# Altium footprint library DT10966_MOTOR_CONTROLLER.PcbLib: 58 footprints (part 2 of 4)
Each footprint in its own frame and in the unit in brackets; x right, y up, seen from the top. Pads: shape width x height; smd on the part's side, far side on the other; paste and mask are expansions set on the pad; w line width, h text height; cw(c..) or ccw(c..) is an arc to the next point about the centre after c.
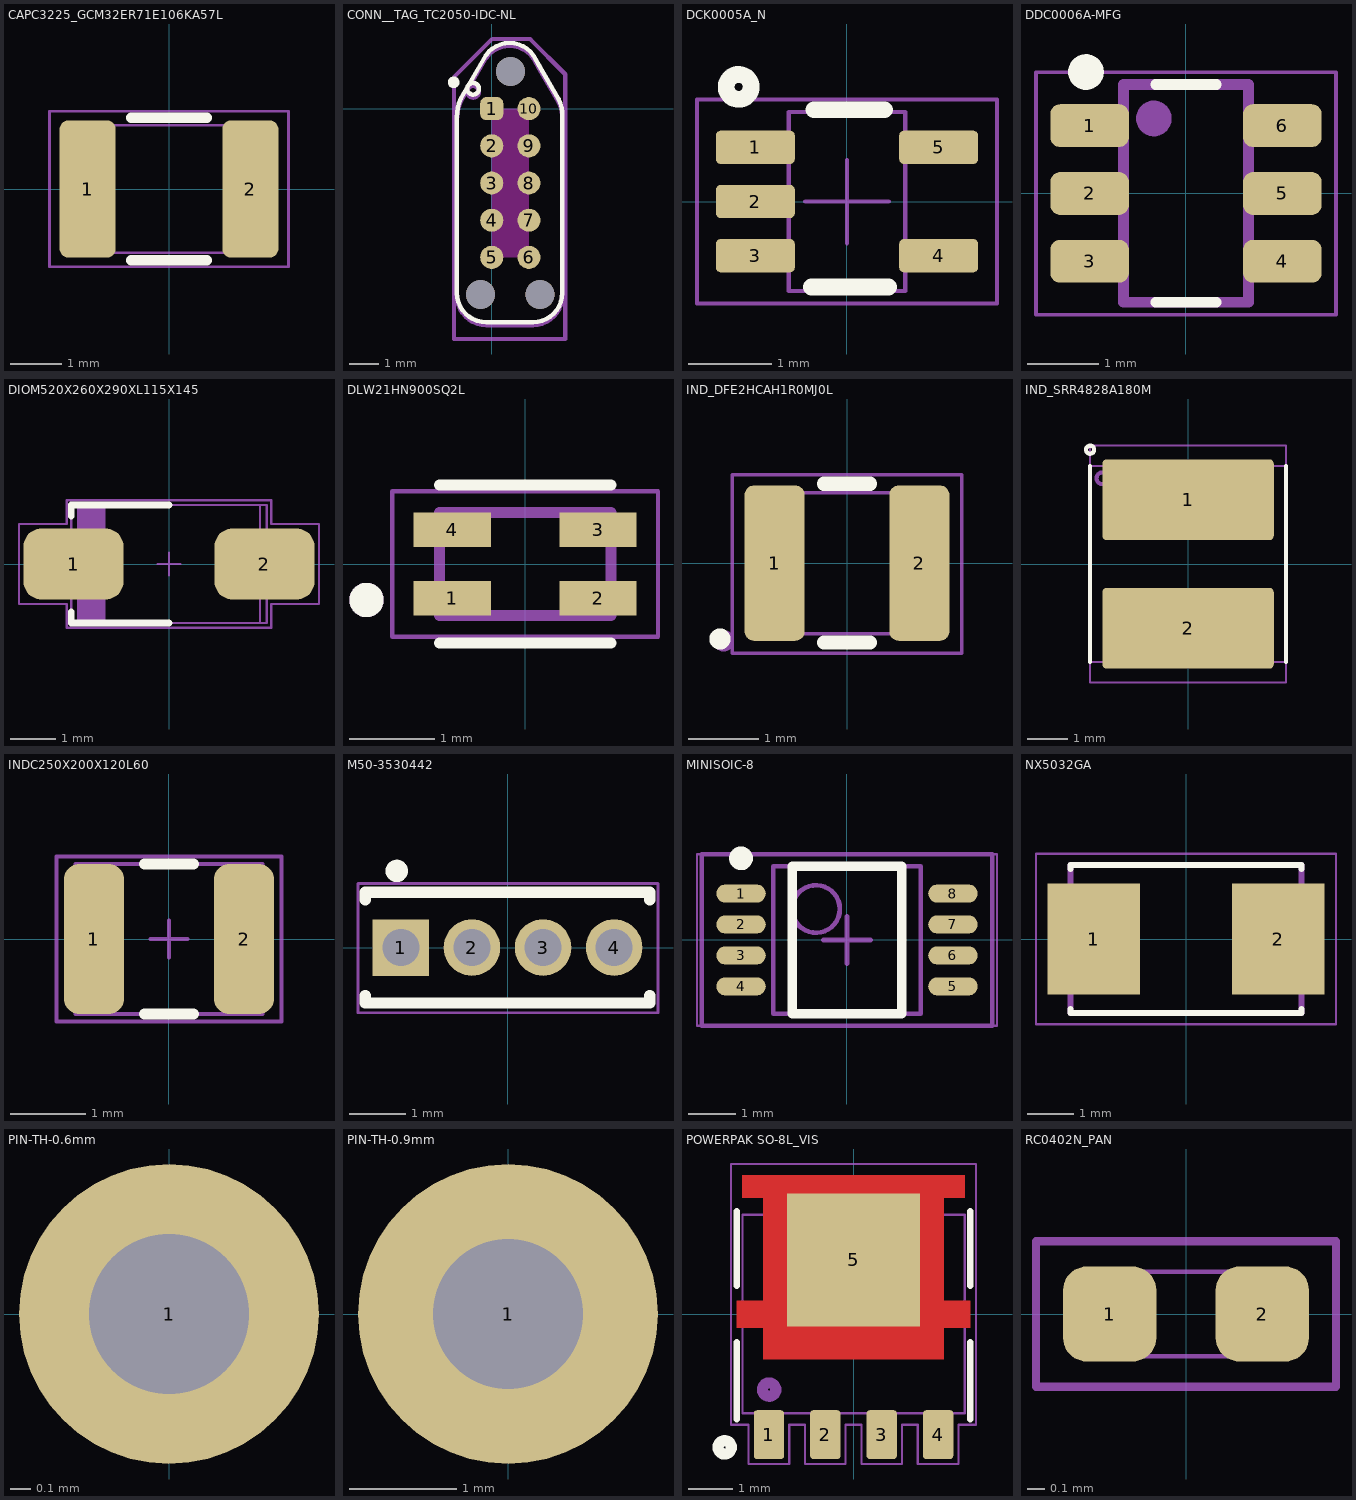
[diagram p1: the footprints below, top view; thin cyan lines are the x and y axes]

## CAPC3225_GCM32ER71E106KA57L [mm]
pads (2):
  rrect30% 1.1x2.7 smd: 1(-1.6,0) 2(1.6,0)
Top Overlay:
  lines w0.2: -0.75,-1.4 0.75,-1.4 ; -0.75,1.4 0.75,1.4
Top Assembly:
  lines w0.05: -1.125,-1.25 -1.125,1.25 ; 1.125,-1.25 1.125,1.25 ; -1.6,-1.25 -1.6,1.25 1.6,1.25 1.6,-1.25 -1.6,-1.25
  text "'.Designator'" at -2.417,1.48 h1
Top Courtyard:
  lines w0.05: -2.35,-1.525 -2.35,1.525 2.35,1.525 2.35,-1.525 -2.35,-1.525
3D body "GCM32EL8EF226KE08L.stp": height 2.52, standoff 0.02, extent -1.6,-1.25 1.6,1.25

## CONN__TAG_TC2050-IDC-NL [mm]
height 0.55
pads (13):
  rrect50% 0.787x0.787 smd paste-1: 1(0,0)
  round 0.787 smd paste-1: 2(0,-1.27) 3(0,-2.54) 4(0,-3.81) 5(0,-5.08) 6(1.27,-5.08) 7(1.27,-3.81) 8(1.27,-2.54) 9(1.27,-1.27) 10(1.27,0)
  round 0.991 hole 0.991 unplated: ""(-0.38,-6.35) ""(0.635,1.27) ""(1.65,-6.35)
Top Layer keep-out:
  region: 1.27,-5.08 0,-5.08 0,0 1.27,0
Top Overlay:
  circle w0.2: c-1.3,0.9 r0.1
  circle w0.152: c-0.64,0.68 r0.2
  lines w0.15: -1.19,-6.295 ccw(c-0.19,-6.295) -0.19,-7.295 1.41,-7.295 ccw(c1.41,-6.295) 2.41,-6.295 2.41,-3.095 2.41,-0.295 ccw(c1.097,-0.233) 2.285,0.33 1.634,1.446 1.426,1.816 ccw(c0.61,1.249) -0.206,1.816 -1.065,0.33 ccw(c0.301,-0.268) -1.19,-0.295 -1.19,-6.295
Keep-Out Layer:
  region: 1.27,-5.08 0,-5.08 0,0 1.27,0
Top Assembly:
  circle w0.152: c-0.64,0.58 r0.2
  lines w0.15: -1.19,-6.395 ccw(c-0.19,-6.395) -0.19,-7.395 1.41,-7.395 ccw(c1.41,-6.395) 2.41,-6.395 2.41,-3.195 2.41,-0.395 ccw(c1.097,-0.333) 2.285,0.23 1.634,1.346 1.426,1.716 ccw(c0.61,1.149) -0.206,1.716 -1.065,0.23 ccw(c0.301,-0.368) -1.19,-0.395 -1.19,-6.395
  text "'.Designator'" at 0.354,-5.288 h1
Top Courtyard:
  lines w0.152: -1.29,-7.87 2.51,-7.87 2.51,1.18 1.31,2.38 0.01,2.38 -1.29,1.08 -1.29,-7.87
3D body "step_temp.STEP": height 201.41, standoff -2.99, extent -7.02,-8.748 8.22,7

## DCK0005A_N [mm]
height 0.55
pads (5):
  rrect30% 0.95x0.4 smd mask+0: 1(-1.1,0.65) 2(-1.1,0) 3(-1.1,-0.65)
  rrect30% 0.95x0.4 smd: 4(1.1,-0.65) 5(1.1,0.65)
Top Overlay:
  circle w0.2: c-1.3,1.375 r0.15
  lines w0.2: -0.425,-1.025 0.5,-1.025 ; -0.4,1.1 0.45,1.1
Top Solder:
  rectangle: -1.669,-0.95 -0.523,0.955
Top Assembly:
  lines w0.05: -0.865,0.762 -0.853,0.762 ; -0.711,-0.763 -0.853,-0.763 -0.865,-0.763 -0.959,-0.763 -1.143,-0.763 -1.143,-0.538 -0.959,-0.538 -0.865,-0.538 -0.853,-0.538 -0.711,-0.538 ; -0.711,-0.113 -0.853,-0.113 -0.865,-0.113 -0.959,-0.113 -1.143,-0.113 -1.143,0.112 -0.959,0.112 -0.865,0.112 -0.853,0.112 -0.711,0.112 ; -0.711,0.537 -0.853,0.537 -0.865,0.537 -0.959,0.537 -1.143,0.537 -1.143,0.762 -0.959,0.762 -0.711,0.762 ; 0.711,-0.763 0.847,-0.763 0.859,-0.763 0.953,-0.763 1.137,-0.763 1.137,-0.538 0.953,-0.538 0.859,-0.538 0.847,-0.538 0.711,-0.538 ; 0.711,0.537 0.847,0.537 0.859,0.537 0.953,0.537 1.137,0.537 1.137,0.762 0.953,0.762 0.859,0.762 0.847,0.762 0.711,0.762 ; -0.7,-1.075 0.7,-1.075 0.7,1.075 -0.7,1.075 -0.7,-1.075
  text "'.Designator'" at -2.667,-0.087 h1
Top Courtyard:
  lines w0.05: -0.5,0 0.5,0 ; 0,-0.5 0,0.5 ; -1.8,-1.225 -1.8,1.225 1.8,1.225 1.8,-1.225 -1.8,-1.225
3D body "TLV9001IDCKR.STEP": height 1.1, standoff 0, extent -1.05,-1 1.05,1

## DDC0006A-MFG [mm]
height 0.55
pads (6):
  rrect45% 1.1x0.6 smd: 1(-1.35,0.95) 2(-1.35,0) 3(-1.35,-0.95) 4(1.35,-0.95) 5(1.35,0) 6(1.35,0.95)
Top Overlay:
  circle w0.25: c-1.4,1.7 r0.125
  lines w0.15: -0.425,-1.525 0.425,-1.525 ; -0.425,1.525 0.425,1.525
Top Assembly:
  circle w0.25: c-0.45,1.05 r0.125
  lines w0.15: -0.875,-1.525 -0.875,1.525 0.875,1.525 0.875,-1.525 -0.875,-1.525
  text "'.Designator'" at -2.337,-0.214 h1
Top Courtyard:
  lines w0.05: -2.1,-1.7 2.1,-1.7 2.1,1.7 -2.1,1.7 -2.1,-1.7
3D body "DDC0006A.stp": height 0.95, standoff 0, extent -1.435,-1.45 1.435,1.45

## DIOM520X260X290XL115X145 [mm] "SMA (JEDEC DO-214AC)"
height 2.9
pads (2):
  rrect50% 2.2x1.56 smd: 1(-2.1,0) 2(2.1,0)
Top Overlay:
  lines w0.15: -2.15,-1.05 -2.15,-1.3 0,-1.3 ; -2.15,1.05 -2.15,1.3 0,1.3
Top Assembly:
  rectangle: -2,-1.3 -1.4,1.3
  lines w0.05: -2.15,-0.725 -2.6,-0.725 -2.6,0.725 -2.15,0.725 ; -2,-1.3 -2,1.3 ; 2,-1.3 2,1.3 ; 2.15,-0.725 2.6,-0.725 2.6,0.725 2.15,0.725 ; -2.15,-1.3 -2.15,1.3 2.15,1.3 2.15,-1.3 -2.15,-1.3
  text "'.Designator'" at -2.417,-0.226 h1
Top Courtyard:
  lines w0.05: -0.25,0 0.25,0 ; 0,-0.25 0,0.25 ; -3.3,-0.88 -2.25,-0.88 -2.25,-1.4 0,-1.4 2.25,-1.4 2.25,-0.88 3.3,-0.88 3.3,0 3.3,0.88 2.25,0.88 2.25,1.4 0,1.4 -2.25,1.4 -2.25,0.88 -3.3,0.88 -3.3,0 -3.3,-0.88
3D body "SMA 5.2x2.6x2.4 (JEDEC DO-214AC) SMD.step": height 2.6, standoff 0.03, extent -2.75,-1.4 2.75,1.4

## DLW21HN900SQ2L [mm]
height 0.55
pads (4):
  rect 0.9x0.4 smd paste-1 mask+0.05: 1(-0.85,-0.4) 2(0.85,-0.4) 3(0.85,0.4) 4(-0.85,0.4)
Top Overlay:
  circle w0.2: c-1.85,-0.42 r0.1
  lines w0.127: -1,-0.92 1,-0.92 ; -1,0.92 1,0.92
Top Paste:
  region: -0.4,-0.6 -1.3,-0.6 -1.3,-0.25 -0.4,-0.25
  region: 1.3,-0.6 0.4,-0.6 0.4,-0.25 1.3,-0.25
  region: -0.4,0.25 -1.3,0.25 -1.3,0.6 -0.4,0.6
  region: 1.3,0.25 0.4,0.25 0.4,0.6 1.3,0.6
Top Assembly:
  circle w0.2: c-1.85,-0.42 r0.1
  lines w0.127: -1,-0.6 1,-0.6 1,0.6 -1,0.6 -1,-0.6
  text "'.Designator'" at -2.3,1.288 h1
Top Courtyard:
  lines w0.05: -1.55,-0.85 -1.55,0.85 1.55,0.85 1.55,-0.85 -1.55,-0.85
3D body "step_temp.STEP": height 1, standoff 0, extent -1,-0.6 1,0.6

## IND_DFE2HCAH1R0MJ0L [mm]
pads (2):
  rrect30% 0.85x2.2 smd: 1(-1.025,0) 2(1.025,0)
Top Overlay:
  circle w0.2: c-1.8,-1.075 r0.05
  lines w0.2: -0.325,-1.125 0.325,-1.125 ; -0.325,1.125 0.325,1.125
Top Assembly:
  circle w0.2: c-1.75,-1.1 r0.05
  lines w0.05: -0.8,-1 -0.8,1 ; 0.8,-1 0.8,1 ; -1.25,-1 1.25,-1 1.25,1 -1.25,1 -1.25,-1
  text "'.Designator'" at -2.142,-0.187 h1
Top Courtyard:
  lines w0.05: -1.625,-1.275 -1.625,1.25 1.625,1.25 1.625,-1.275 -1.625,-1.275
3D body "DFE2HCAH1R5MJ0L.stp": height 1.2, standoff 0, extent -1.25,-1 1.25,1

## IND_SRR4828A180M [mm]
height 0.55
pads (2):
  rrect10% 4.2x1.98 smd: 1(0,1.575) 2(0,-1.575)
Top Overlay:
  circle w0.1: c-2.4,2.8 r0.1
  lines w0.1: -2.4,-2.4 -2.4,2.4 ; 2.4,-2.4 2.4,2.4
Top Assembly:
  circle w0.1: c-2.1,2.1 r0.141
  lines w0.05: -2.4,-2.4 -2.4,2.4 2.4,2.4 2.4,-2.4 -2.4,-2.4
  text "'.Designator'" at -2.542,-0.287 h1
Top Courtyard:
  lines w0.05: -2.4,-2.9 -2.4,2.9 2.4,2.9 2.4,-2.9 -2.4,-2.9
3D body "SRR4828A.stp": height 2.8, standoff 0.04, extent -2.4,-2.41 2.4,2.41

## INDC250X200X120L60 [mm] "EIA 1008 (2520) T1.20 2.50x2.00x1.20 Chip Inductor"
height 1.2
pads (2):
  rrect50% 0.8x2 smd: 1(-1,0) 2(1,0)
Top Overlay:
  lines w0.15: -0.325,-1 0.325,-1 ; -0.325,1 0.325,1
Top Assembly:
  lines w0.05: -1.25,-1 -1.25,1 1.25,1 1.25,-1 -1.25,-1
  text "'.Designator'" at -2.417,-0.414 h1
Top Courtyard:
  lines w0.05: -0.25,0 0.25,0 ; 0,-0.25 0,0.25 ; -1.5,-1.1 1.5,-1.1 1.5,1.1 -1.5,1.1 -1.5,-1.1
3D body "1239AS-H-100M=P2.STEP": height 1.2, standoff 0, extent -1.25,-1 1.25,1

## M50-3530442 [mm]
pads (4):
  rect 1.01x1.01 hole 0.66 mask+0.06: 1(-1.905,0)
  round 1.01 hole 0.66 mask+0.06: 2(-0.635,0) 3(0.635,0) 4(1.905,0)
Top Overlay:
  circle w0.2: c-1.978,1.369 r0.1
  lines w0.2: -2.54,-0.855 -2.54,-0.989 2.54,-0.989 2.54,-0.855 ; -2.54,0.855 -2.54,0.986 2.54,0.986 2.54,0.855
Top Courtyard:
  lines w0.05: -2.67,-1.164 2.688,-1.164 2.688,1.141 -2.67,1.141 -2.67,-1.164
3D body "M50-3530442_asm.stp": height 4.02, standoff -2.28, extent -2.531,-1.056 2.549,1.044

## MINISOIC-8 [mm] "MINISOIC, 8-Leads, Body 3,00x3,00mm, Pitch 0,65mm, IPC Medium Density"
height 1.1
pads (8):
  oval 1.04x0.38 smd: 1(-2.225,0.975) 2(-2.225,0.325) 3(-2.225,-0.325) 4(-2.225,-0.975) 5(2.225,-0.975) 6(2.225,-0.325) 7(2.225,0.325) 8(2.225,0.975)
Top Overlay:
  circle w0.25: c-2.225,1.715 r0.125
  lines w0.2: -1.15,-1.55 -1.15,1.55 1.15,1.55 1.15,-1.55 -1.15,-1.55
Mechanical 5:
  lines w0.05: -3.15,-1.8 -3.15,1.8 3.15,1.8 3.15,-1.8 -3.15,-1.8
  lines w0.1: -0.5,0 0.5,0 ; 0,-0.5 0,0.5
Top Assembly:
  circle w0.1: c-0.65,0.65 r0.5
  lines w0.1: -1.55,-1.55 1.55,-1.55 ; -1.55,-1.55 -1.55,1.55 ; -1.55,-1.55 1.55,-1.55 ; -1.55,-1.55 -1.55,1.55 ; -1.55,1.55 1.55,1.55 ; -1.55,1.55 1.55,1.55 ; 1.55,-1.55 1.55,1.55 ; 1.55,-1.55 1.55,1.55
  text "'.Designator'" at -2.85,1.8 h1.52
Top Courtyard:
  lines w0.1: -3.05,-1.8 -3.05,1.8 3.05,1.8 3.05,-1.8 -3.05,-1.8
3D body "MINISOIC-8.step": height 1.1, standoff 0, extent -2.45,-1.55 2.45,1.55

## NX5032GA [mm]
height 0.55
pads (2):
  rect 2x2.4 smd: 1(-2,0) 2(2,0)
Top Overlay:
  lines w0.127: -2.5,-1.52 -2.5,-1.6 2.5,-1.6 2.5,-1.52 ; -2.5,1.52 -2.5,1.6 2.5,1.6 2.5,1.52
Top Assembly:
  lines w0.127: -2.5,-1.6 2.5,-1.6 2.5,1.6 -2.5,1.6 -2.5,-1.6
  text "'.Designator'" at -6,2.07 h2.5
Top Courtyard:
  lines w0.05: -3.25,-1.85 3.25,-1.85 3.25,1.85 -3.25,1.85 -3.25,-1.85
3D body "step_temp.STEP": height 1.5, standoff 0, extent -2.5,-1.6 2.5,1.6

## PIN-TH-0.6mm [mm]
height 0.55
pads (1):
  round 1.5 hole 0.8: 1(0,0)

## PIN-TH-0.9mm [mm]
height 0.55
pads (1):
  round 2.8 hole 1.4: 1(0,0)

## POWERPAK SO-8L_VIS [mm]
height 0.55
pads (6):
  rrect20% 0.68x1.1 smd paste+0 mask+0: 1(-1.905,-2.715) 2(-0.635,-2.715) 3(0.635,-2.715) 4(1.905,-2.715)
  rect 0.127x0.127 smd paste-0.064 mask-0.064: 5(0,0.621)
  rect 3x3 smd paste+0 mask+0: 5(0,1.219)
Top Layer:
  region: 2.502,3.125 -2.502,3.125 -2.502,2.615 -2.032,2.615 -2.032,0.303 -2.627,0.303 -2.627,-0.307 -2.032,-0.307 -2.032,-1.017 2.032,-1.017 2.032,-0.307 2.627,-0.307 2.627,0.303 2.032,0.303 2.032,2.615 2.502,2.615
Top Overlay:
  circle w0.25: c-2.9,-3 r0.15
  lines w0.152: -2.629,-2.362 -2.629,-0.64 ; -2.629,0.636 -2.629,2.308 ; 2.629,-2.362 2.629,-0.64 ; 2.629,0.636 2.629,2.308
Top Paste:
  region: 2.502,3.125 -2.502,3.125 -2.502,2.615 -2.032,2.615 -2.032,0.303 -2.627,0.303 -2.627,-0.307 -2.032,-0.307 -2.032,-1.017 2.032,-1.017 2.032,-0.307 2.627,-0.307 2.627,0.303 2.032,0.303 2.032,2.615 2.502,2.615
Top Solder:
  region: 2.502,3.125 -2.502,3.125 -2.502,2.615 -2.032,2.615 -2.032,0.303 -2.627,0.303 -2.627,-0.307 -2.032,-0.307 -2.032,-1.017 2.032,-1.017 2.032,-0.307 2.627,-0.307 2.627,0.303 2.032,0.303 2.032,2.615 2.502,2.615
Top Assembly:
  circle w0.25: c-1.9,-1.7 r0.15
  lines w0.05: -2.502,-2.235 2.502,-2.235 2.502,2.235 -2.502,2.235 -2.502,-2.235
  text "'.Designator'" at -2.442,-0.237 h1
Top Courtyard:
  lines w0.05: -2.756,-2.489 -2.756,3.378 2.756,3.378 2.756,-2.489 2.362,-2.489 2.362,-3.375 1.448,-3.375 1.448,-2.489 1.092,-2.489 1.092,-3.375 0.178,-3.375 0.178,-2.489 -0.178,-2.489 -0.178,-3.375 -1.092,-3.375 -1.092,-2.489 -1.448,-2.489 -1.448,-3.375 -2.362,-3.375 -2.362,-2.489 -2.756,-2.489
3D body "PowerPAK SO-8L DUAL.STEP": height 1.17, standoff 0, extent -2.552,-3.1 2.552,3.058

## RC0402N_PAN [mm]
height 0.55
pads (2):
  rrect50% 0.55x0.56 smd: 1(-0.45,0) 2(0.45,0)
Top Assembly:
  lines w0.025: -0.525,-0.25 -0.525,0.25 ; -0.525,-0.25 -0.225,-0.25 -0.225,0.25 -0.525,0.25 ; -0.525,-0.25 -0.525,0.25 ; -0.525,-0.25 0.525,-0.25 ; -0.525,0.25 0.525,0.25 ; 0.525,-0.25 0.525,0.25 ; 0.525,-0.25 0.225,-0.25 0.225,0.25 0.525,0.25 ; 0.525,-0.25 0.525,0.25
  text "'.Designator'" at -2.492,-0.187 h1
Top Courtyard:
  lines w0.05: -0.885,-0.429 -0.885,0.429 0.885,0.429 0.885,-0.429 -0.885,-0.429
3D body "RC0402N_PAN.step": height 0.71, standoff 0, extent -0.525,-0.25 0.525,0.25